# Altium footprint library PTS636SK25JSMTRLFS.PcbLib: 3 footprints
Each footprint in its own frame and in the unit in brackets; x right, y up, seen from the top. Pads: shape width x height; smd on the part's side, far side on the other; paste and mask are expansions set on the pad; w line width, h text height; cw(c..) or ccw(c..) is an arc to the next point about the centre after c.
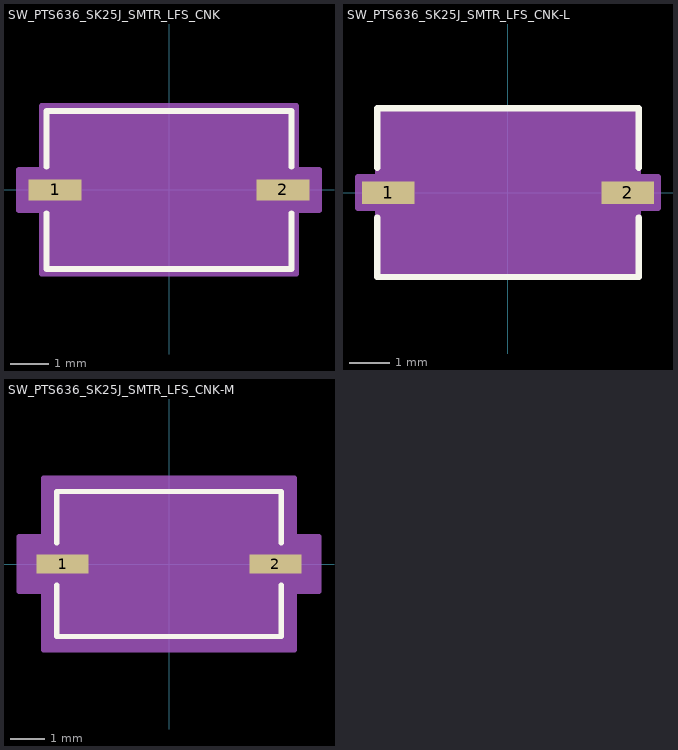
[diagram p0: the footprints below, top view; thin cyan lines are the x and y axes]

## SW_PTS636_SK25J_SMTR_LFS_CNK [mm]
pads (2):
  rect 1.392x0.56 smd paste+0 mask+0: 1(-3.004,0) 2(3.004,0)
Top Overlay:
  lines w0.152: -3.226,-0.613 -3.226,-2.083 3.226,-2.083 3.226,-0.613 ; -3.226,0.613 -3.226,2.083 3.226,2.083 3.226,0.613
  text ".Designator" at -3.492,-0.635 h1.27
Mechanical 13:
  circle w0.025: c-2.308,0 r0.076
  lines w0.025: -0.305,1.956 ccw(c0,1.956) 0.305,1.956 ; -3.099,-1.956 3.099,-1.956 3.099,1.956 -3.099,1.956 -3.099,-1.956
  text ".Designator" at -3.492,-0.635 h1.27
Mechanical 15:
  region: -3.353,-0.534 -3.954,-0.534 -3.954,0.534 -3.353,0.534 -3.353,2.21 3.353,2.21 3.353,0.534 3.954,0.534 3.954,-0.534 3.353,-0.534 3.353,-2.21 -3.353,-2.21
  lines w0.152: -3.954,-0.534 -3.954,0.534 -3.353,0.534 -3.353,2.21 3.353,2.21 3.353,0.534 3.954,0.534 3.954,-0.534 3.353,-0.534 3.353,-2.21 -3.353,-2.21 -3.353,-0.534 -3.954,-0.534
3D body "SW_PTS636_SK25J_SMTR_LFS_CNK.step": height 2.49, standoff 0, extent -3.4,-1.956 3.4,1.956

## SW_PTS636_SK25J_SMTR_LFS_CNK-L [mm]
pads (2):
  rect 1.292x0.56 smd paste+0 mask+0: 1(-2.954,0) 2(2.954,0)
Top Overlay:
  lines w0.152: -3.226,-0.613 -3.226,-2.083 3.226,-2.083 3.226,-0.613 ; -3.226,0.613 -3.226,2.083 3.226,2.083 3.226,0.613
  text ".Designator" at -3.492,-0.635 h1.27
Mechanical 13:
  circle w0.025: c-2.308,0 r0.076
  lines w0.025: -0.305,1.956 ccw(c0,1.956) 0.305,1.956 ; -3.099,-1.956 3.099,-1.956 3.099,1.956 -3.099,1.956 -3.099,-1.956
  text ".Designator" at -3.492,-0.635 h1.27
Mechanical 15:
  region: -3.2,-0.381 -3.702,-0.381 -3.702,0.381 -3.2,0.381 -3.2,2.057 3.2,2.057 3.2,0.381 3.702,0.381 3.702,-0.381 3.2,-0.381 3.2,-2.057 -3.2,-2.057
  lines w0.152: -3.702,-0.381 -3.702,0.381 -3.2,0.381 -3.2,2.057 3.2,2.057 3.2,0.381 3.702,0.381 3.702,-0.381 3.2,-0.381 3.2,-2.057 -3.2,-2.057 -3.2,-0.381 -3.702,-0.381
3D body "SW_PTS636_SK25J_SMTR_LFS_CNK.step": height 2.49, standoff 0, extent -3.4,-1.956 3.4,1.956

## SW_PTS636_SK25J_SMTR_LFS_CNK-M [mm]
pads (2):
  rect 1.492x0.56 smd paste+0 mask+0: 1(-3.054,0) 2(3.054,0)
Top Overlay:
  lines w0.152: -3.226,-0.613 -3.226,-2.083 3.226,-2.083 3.226,-0.613 ; -3.226,0.613 -3.226,2.083 3.226,2.083 3.226,0.613
  text ".Designator" at -3.492,-0.635 h1.27
Mechanical 13:
  circle w0.025: c-2.308,0 r0.076
  lines w0.025: -0.305,1.956 ccw(c0,1.956) 0.305,1.956 ; -3.099,-1.956 3.099,-1.956 3.099,1.956 -3.099,1.956 -3.099,-1.956
  text ".Designator" at -3.492,-0.635 h1.27
Mechanical 15:
  region: -3.607,-0.788 -4.308,-0.788 -4.308,0.788 -3.607,0.788 -3.607,2.464 3.607,2.464 3.607,0.788 4.308,0.788 4.308,-0.788 3.607,-0.788 3.607,-2.464 -3.607,-2.464
  lines w0.152: -4.308,-0.788 -4.308,0.788 -3.607,0.788 -3.607,2.464 3.607,2.464 3.607,0.788 4.308,0.788 4.308,-0.788 3.607,-0.788 3.607,-2.464 -3.607,-2.464 -3.607,-0.788 -4.308,-0.788
3D body "SW_PTS636_SK25J_SMTR_LFS_CNK.step": height 2.49, standoff 0, extent -3.4,-1.956 3.4,1.956